# Altium footprint library TS3USB221ARSER.PcbLib: 1 footprints
Each footprint in its own frame and in the unit in brackets; x right, y up, seen from the top. Pads: shape width x height; smd on the part's side, far side on the other; paste and mask are expansions set on the pad; w line width, h text height; cw(c..) or ccw(c..) is an arc to the next point about the centre after c.
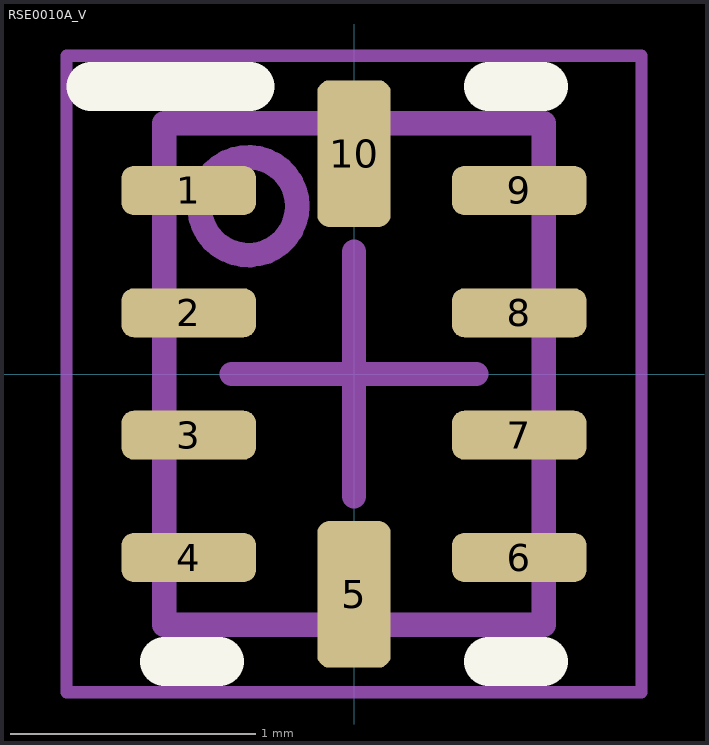
[diagram p0: the footprint, top view; thin cyan lines are the x and y axes]

## RSE0010A_V [mm] "QFN, 10-Leads, Body 1.5x2mm, Pitch 0.5mm, TI Recommended"
height 0.6
pads (10):
  rrect50% 0.55x0.2 smd: 1(-0.675,0.75) 2(-0.675,0.25) 3(-0.675,-0.25) 4(-0.675,-0.75) 6(0.675,-0.75) 7(0.675,-0.25) 8(0.675,0.25) 9(0.675,0.75)
  rrect33% 0.3x0.6 smd: 5(0,-0.9) 10(0,0.9)
Top Overlay:
  lines w0.2: -1.075,1.175 -0.425,1.175 ; -0.775,-1.175 -0.55,-1.175 ; 0.55,-1.175 0.775,-1.175 ; 0.55,1.175 0.775,1.175
Mechanical 1:
  text ".Designator" at -0.8,-0.2 h0.4
Mechanical 13:
  circle w0.1: c-0.432,0.686 r0.2
  lines w0.1: -0.775,-1.025 -0.775,1.025 0.775,1.025 0.775,-1.025 -0.775,-1.025
Mechanical 15:
  lines w0.05: -1.175,-1.3 1.175,-1.3 1.175,1.3 -1.175,1.3 -1.175,-1.3
  lines w0.1: -0.5,0 0.5,0 ; 0,-0.5 0,0.5
3D body: height 0.61, standoff 0.3, extent -0.635,0.482 -0.228,0.889
3D body: height 0.6, standoff 0, extent -0.775,-1.025 0.775,1.025